# Altium footprint library new-version2.PcbLib: 88 footprints (part 1 of 6)
Each footprint in its own frame and in the unit in brackets; x right, y up, seen from the top. Pads: shape width x height; smd on the part's side, far side on the other; paste and mask are expansions set on the pad; w line width, h text height; cw(c..) or ccw(c..) is an arc to the next point about the centre after c.
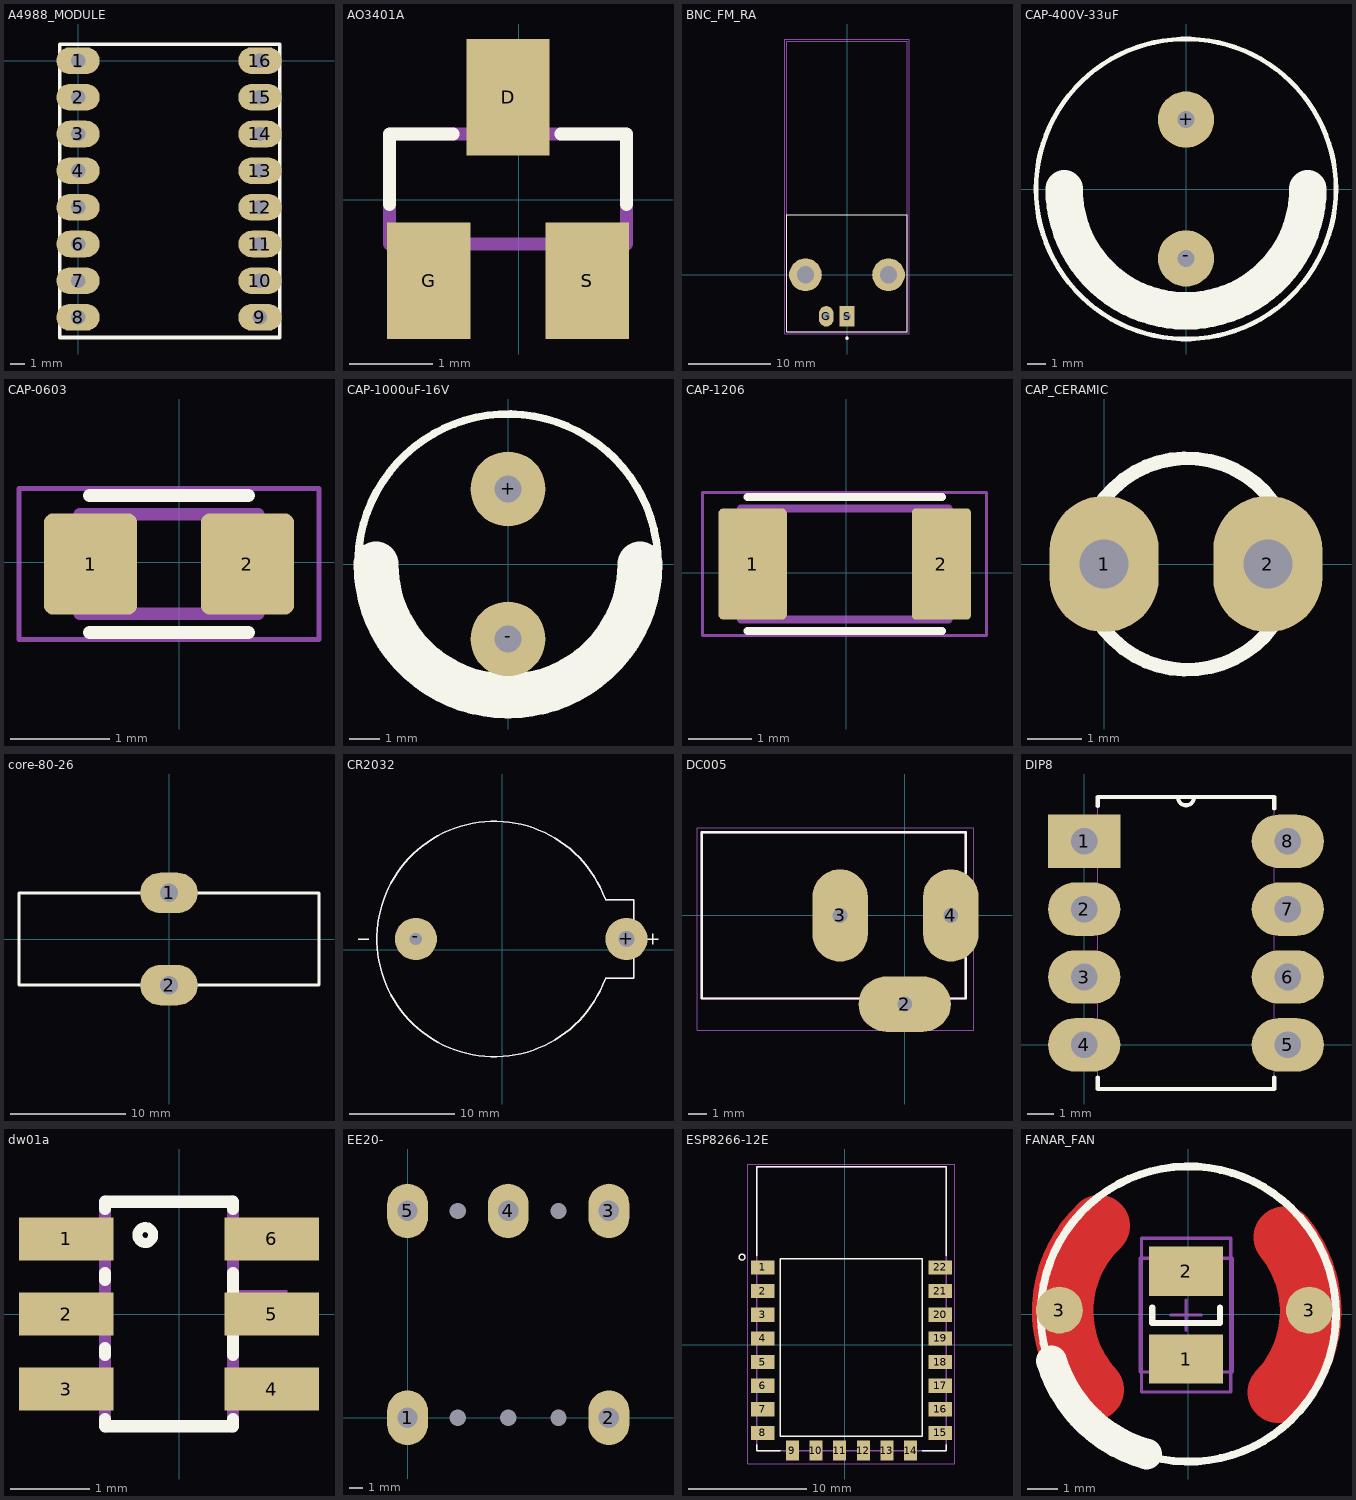
[diagram p0: the footprints below, top view; thin cyan lines are the x and y axes]

## A4988_MODULE [mm]
pads (16):
  oval 3x1.85 hole 1: 1(0,0) 2(0,-2.54) 3(0,-5.08) 4(0,-7.62) 5(0,-10.16) 6(0,-12.7) 7(0,-15.24) 8(0,-17.78) 9(12.6,-17.78) 10(12.6,-15.24) 11(12.6,-12.7) 12(12.6,-10.16) 13(12.6,-7.62) 14(12.6,-5.08) 15(12.6,-2.54) 16(12.6,0)
Top Overlay:
  lines w0.254: -1.27,-19.177 -1.27,1.143 13.97,1.143 13.97,-19.177 -1.27,-19.177

## AO3401A [mm]
pads (3):
  rect 1x1.4 smd: D(-0.127,1.227) G(-1.077,-0.973) S(0.823,-0.973)
Top Overlay:
  lines w0.152: -1.549,-0.058 -1.549,0.787 -0.785,0.787 ; 0.506,0.787 1.295,0.787 1.295,-0.058
Mechanical 13:
  region: 0.102,0.839 -0.356,0.839 -0.356,1.422 0.102,1.422
  region: 1.041,-1.169 0.584,-1.169 0.584,-0.584 1.041,-0.584
  region: -0.838,-1.171 -1.298,-1.171 -1.298,-0.584 -0.838,-0.584
  region: 0.102,0.838 -0.356,0.838 -0.356,1.422 0.102,1.422
  region: 0.102,0.839 -0.356,0.839 -0.356,1.422 0.102,1.422
  region: 0.102,0.839 -0.356,0.839 -0.356,1.422 0.102,1.422
  region: 0.102,0.839 -0.356,0.839 -0.356,1.422 0.102,1.422
  region: 0.102,0.839 -0.356,0.839 -0.356,1.422 0.102,1.422
  lines w0.152: -1.549,-0.533 1.295,-0.533 1.295,0.787 -1.549,0.787 -1.549,-0.533

## BNC_FM_RA [mm]
pads (4):
  oval 1.8x2.5 hole 0.97: G(-2.543,-5.077)
  rect 1.8x2.5 hole 0.97: S(-0.003,-5.077)
  round 4 hole 2.09 unplated: ""(-5.083,0.003) ""(5.077,0.003)
Top Overlay:
  circle w0.2: c-0.003,-7.747 r0.1
  lines w0.127: -7.383,-6.977 -7.383,7.373 7.377,7.373 7.377,-6.977 -7.383,-6.977
Mechanical 13:
  circle w0.2: c-0.003,-7.747 r0.1
  lines w0.127: -7.383,-6.977 7.377,-6.977 7.377,28.583 -7.383,28.583 -7.383,-6.977
Mechanical 15:
  lines w0.05: -7.633,-7.227 -7.633,28.833 7.627,28.833 7.627,-7.227 -7.633,-7.227
3D body "BNC_FM_RI.stp": height 15.94, standoff -3.02, extent -8.068,-6.243 8.21,28.681

## CAP-400V-33uF [mm]
pads (2):
  round 3 hole 0.9: +(0,3.7) -(0,-3.7)
Top Overlay:
  circle w0.254: c0,0 r8
  lines w2: -6.5,0 ccw(c0,0) 6.5,0

## CAP-0603 [mm]
pads (2):
  rrect20% 0.94x1.02 smd: 1(-0.893,-0.017) 2(0.687,-0.017)
Top Overlay:
  lines w0.127: -0.903,-0.707 0.697,-0.707 ; -0.903,0.673 0.697,0.673
Mechanical 13:
  lines w0.127: -1.003,-0.517 -1.003,0.483 0.797,0.483 0.797,-0.517 -1.003,-0.517
Mechanical 15:
  lines w0.05: -1.613,-0.777 -1.613,0.743 1.407,0.743 1.407,-0.777 -1.613,-0.777
3D body "CAP-0603.STEP": height 0.77, standoff -0.04, extent -0.837,-0.444 0.763,0.456

## CAP-1000uF-16V [mm]
pads (2):
  round 2.5 hole 0.9: +(0,2.5) -(0,-2.5)
Top Overlay:
  circle w0.254: c0,0 r5
  lines w1.5: -4.4,0 ccw(c0,0) 4.4,0

## CAP-1206 [mm]
pads (2):
  rrect14% 1.09x1.77 smd: 1(-1.488,0.139)
  rrect14% 0.94x1.77 smd: 2(1.517,0.139)
Top Overlay:
  lines w0.127: -1.573,-0.926 1.527,-0.926 ; -1.573,1.204 1.527,1.204
Mechanical 13:
  lines w0.127: -1.673,-0.741 1.627,-0.741 1.627,1.019 -1.673,1.019 -1.673,-0.741
Mechanical 15:
  lines w0.05: -2.283,-1.001 2.237,-1.001 2.237,1.279 -2.283,1.279 -2.283,-1.001
3D body "CAP-1206.STEP": height 1.6, standoff 0, extent -1.63,-0.596 1.57,0.904

## CAP_CERAMIC [mm]
pads (2):
  oval 2x2.5 hole 0.9: 1(0,0) 2(3,0)
Top Overlay:
  circle w0.254: c1.524,0 r1.939

## core-80-26 [mm]
pads (2):
  oval 5x3.5 hole 1.6: 1(0,4) 2(0,-4)
Top Overlay:
  lines w0.254: -13,-4 13,-4 13,4 -13,4 -13,-4

## CR2032 [mm]
pads (2):
  round 4 hole 1.5: +(11.778,1.016)
  round 4 hole 1.17: -(-8.222,1.016)
Top Overlay:
  lines w0.127: -13.722,1.016 -12.722,1.016 ; 9.747,-2.807 cw(c-0.757,1.016) 9.747,4.839 ; 9.773,-2.734 12.468,-2.734 12.468,-0.454 ; 9.773,4.766 12.468,4.766 12.468,2.486 ; 13.778,1.016 14.778,1.016 ; 14.278,0.516 14.278,1.516
Mechanical 13:
  lines w0.127: 9.747,-2.807 cw(c-0.757,1.016) 9.747,4.839 ; 9.773,-2.734 12.468,-2.734 12.468,4.766 9.773,4.766
3D body: height 5.5, standoff 0, extent -13.081,7.493 -13.081,7.493
3D body: height 2.54, standoff -2.54, extent -10.16,-3.937 -10.16,-3.937
3D body "BS-7--3DModel-STEP-1.STEP": height 8.5, standoff -3.6, extent -11.932,-10.156 12.468,12.188

## DC005 [mm]
pads (3):
  oval 5x3 hole 0.8 square: 2(-0.014,-4.804)
  oval 3x5 hole 0.8 square: 3(-3.514,-0.004) 4(2.486,-0.004)
Top Overlay:
  lines w0.127: -2.414,-4.504 -11.014,-4.504 -11.014,4.496 3.286,4.496 3.286,2.296 ; 2.386,-4.504 3.286,-4.504 3.286,-2.304
Mechanical 13:
  lines w0.127: -11.014,-4.504 3.286,-4.504 3.286,4.496 -11.014,4.496 -11.014,-4.504
Mechanical 15:
  lines w0.05: -11.264,-6.234 3.736,-6.234 3.736,4.746 -11.264,4.746 -11.264,-6.234
3D body "DC-005.STEP": height 11, standoff -4.4, extent -11.063,-4.942 3.237,4.458

## DIP8 [mm]
pads (8):
  rect 2.7x2 hole 1: 1(0,7.62)
  oval 2.7x2 hole 1: 2(0,5.08) 3(0,2.54) 4(0,0) 5(7.62,0) 6(7.62,2.54) 7(7.62,5.08) 8(7.62,7.62)
Top Overlay:
  lines w0.152: 0.508,-1.219 0.508,-1.651 7.112,-1.651 7.112,-1.219 ; 0.508,8.941 0.508,9.271 3.505,9.271 ; 7.112,8.839 7.112,9.271 4.115,9.271 ; 3.505,9.271 ccw(c3.81,9.271) 4.115,9.271 ; 3.505,9.271 4.115,9.271
Mechanical 13:
  lines w0: 3.505,9.271 ccw(c3.81,9.271) 4.115,9.271 ; 3.505,9.271 0.508,9.271 0.508,-1.651 7.112,-1.651 7.112,9.271 4.115,9.271 ; 3.505,9.271 4.115,9.271 ; -0.559,-0.559 0.508,-0.559 0.508,0.559 -0.559,0.559 -0.559,-0.559 ; -0.559,1.981 0.508,1.981 0.508,3.099 -0.559,3.099 -0.559,1.981 ; -0.559,4.521 0.508,4.521 0.508,5.639 -0.559,5.639 -0.559,4.521 ; -0.559,7.061 0.508,7.061 0.508,8.179 -0.559,8.179 -0.559,7.061 ; 7.112,-0.559 8.179,-0.559 8.179,0.559 7.112,0.559 7.112,-0.559 ; 7.112,1.981 8.179,1.981 8.179,3.099 7.112,3.099 7.112,1.981 ; 7.112,4.521 8.179,4.521 8.179,5.639 7.112,5.639 7.112,4.521 ; 7.112,7.061 8.179,7.061 8.179,8.179 7.112,8.179 7.112,7.061

## dw01a [mm]
pads (6):
  rect 1.2x0.55 smd: 1(-1.427,0.95) 2(-1.427,0) 3(-1.427,-0.95) 4(1.173,-0.95) 5(1.173,0) 6(1.173,0.95)
Top Overlay:
  circle w0.127: c-0.427,1 r0.1
  lines w0.152: -0.937,-1.328 -0.937,-1.422 0.683,-1.422 0.683,-1.328 ; -0.937,-0.522 -0.937,-0.428 ; -0.937,0.428 -0.937,0.522 ; -0.937,1.328 -0.937,1.422 0.683,1.422 0.683,1.328 ; 0.683,-0.522 0.683,0.522
Mechanical 13:
  region: -1.627,0.7 -1.627,1.2 -0.977,1.2 -0.977,0.7
  region: -1.627,-0.25 -1.627,0.25 -0.977,0.25 -0.977,-0.25
  region: -1.627,-1.2 -1.627,-0.7 -0.977,-0.7 -0.977,-1.2
  region: 0.723,-1.2 0.723,-0.7 1.373,-0.7 1.373,-1.2
  region: 0.723,0.7 0.723,1.2 1.373,1.2 1.373,0.7
  region: 0.723,-0.2 0.723,0.3 1.373,0.3 1.373,-0.2
  lines w0.152: -0.937,-1.422 -0.937,1.422 ; 0.683,-1.422 0.683,1.422

## EE20- [mm]
pads (10):
  oval 3x4 hole 1.5: 1(-0.001,-0.003) 2(14.799,-0.003) 3(14.799,15.197) 4(7.399,15.197) 5(-0.001,15.197)
  round 0 hole 1.2: 2(3.699,-0.003) 3(7.399,-0.003) 4(11.099,-0.003) 7(3.699,15.197) 9(11.099,15.197)
Bottom Overlay:
  lines w0.254: -3.641,-3.313 18.409,-3.313 18.409,18.557 -3.641,18.557 -3.641,-3.313

## ESP8266-12E [mm]
pads (22):
  rect 2x1.2 smd: 1(-6.938,6.54) 2(-6.938,4.54) 3(-6.938,2.54) 4(-6.938,0.54) 5(-6.938,-1.46) 6(-6.938,-3.46) 7(-6.938,-5.46) 8(-6.938,-7.46) 15(8.062,-7.46) 16(8.062,-5.46) 17(8.062,-3.46) 18(8.062,-1.46) 19(8.062,0.54) 20(8.062,2.54) 21(8.062,4.54) 22(8.062,6.54)
  rect 1.1x1.7 smd: 9(-4.438,-8.96) 10(-2.438,-8.96) 11(-0.438,-8.96) 12(1.562,-8.96) 13(3.562,-8.96) 14(5.562,-8.96)
Top Overlay:
  circle w0.127: c-8.688,7.415 r0.25
  lines w0.127: -7.438,-8.46 -7.438,-8.96 -5.438,-8.96 ; -7.438,7.54 -7.438,15.04 8.562,15.04 8.562,7.54 ; 6.562,-8.96 8.562,-8.96 8.562,-8.46 ; -5.438,-7.72 6.562,-7.72 6.562,7.28 -5.438,7.28 -5.438,-7.72
Mechanical 13:
  lines w0.127: -7.438,-8.96 8.562,-8.96 8.562,15.04 -7.438,15.04 -7.438,-8.96
Mechanical 15:
  lines w0.05: -8.188,-10.085 9.312,-10.085 9.312,15.29 -8.188,15.29 -8.188,-10.085
3D body "User Library-EPS8266 ESP-12E-1.sldprt": height 2.65, standoff -0.04, extent -7.443,-9.036 8.567,14.969

## FANAR_FAN [mil]
pads (4):
  rect 94.49x62.99 smd: 1(-2.84,-57.61) 2(-2.84,54.6)
  round 60 smd paste-60: 3(-165,5) 3(155,5)
Top Layer:
  lines w78.74: -121.56,-97.24 cw(c-11.28,3.86) -113.81,112.8 ; 115,-100 ccw(c6.89,3.41) 122.68,98.15
Top Overlay:
  circle w10: c0,0 r188.98
  lines w7.87: -46.15,8.34 -46.15,-11.35 40.47,-11.35 40.47,8.34
  lines w39.37: -175,-60 ccw(c-5.38,-8.84) -53.65,-179.3
Mechanical 13:
  lines w3.94: -61.9,-74.34 56.21,-74.34 56.21,71.33 -61.9,71.33 -61.9,-74.34
Mechanical 15:
  lines w3.94: -22.53,-1.51 16.84,-1.51 ; -2.84,-21.19 -2.84,18.18 ; -59.93,-99.93 54.25,-99.93 54.25,96.92 -59.93,96.92 -59.93,-99.93
3D body "WL-SMTW_3528.stp": height 72.83, standoff -1.97, extent -57.96,-70.4 52.27,67.39